# Altium footprint library MicroController$.PcbLib: 36 footprints (part 1 of 3)
Each footprint in its own frame and in the unit in brackets; x right, y up, seen from the top. Pads: shape width x height; smd on the part's side, far side on the other; paste and mask are expansions set on the pad; w line width, h text height; cw(c..) or ccw(c..) is an arc to the next point about the centre after c.
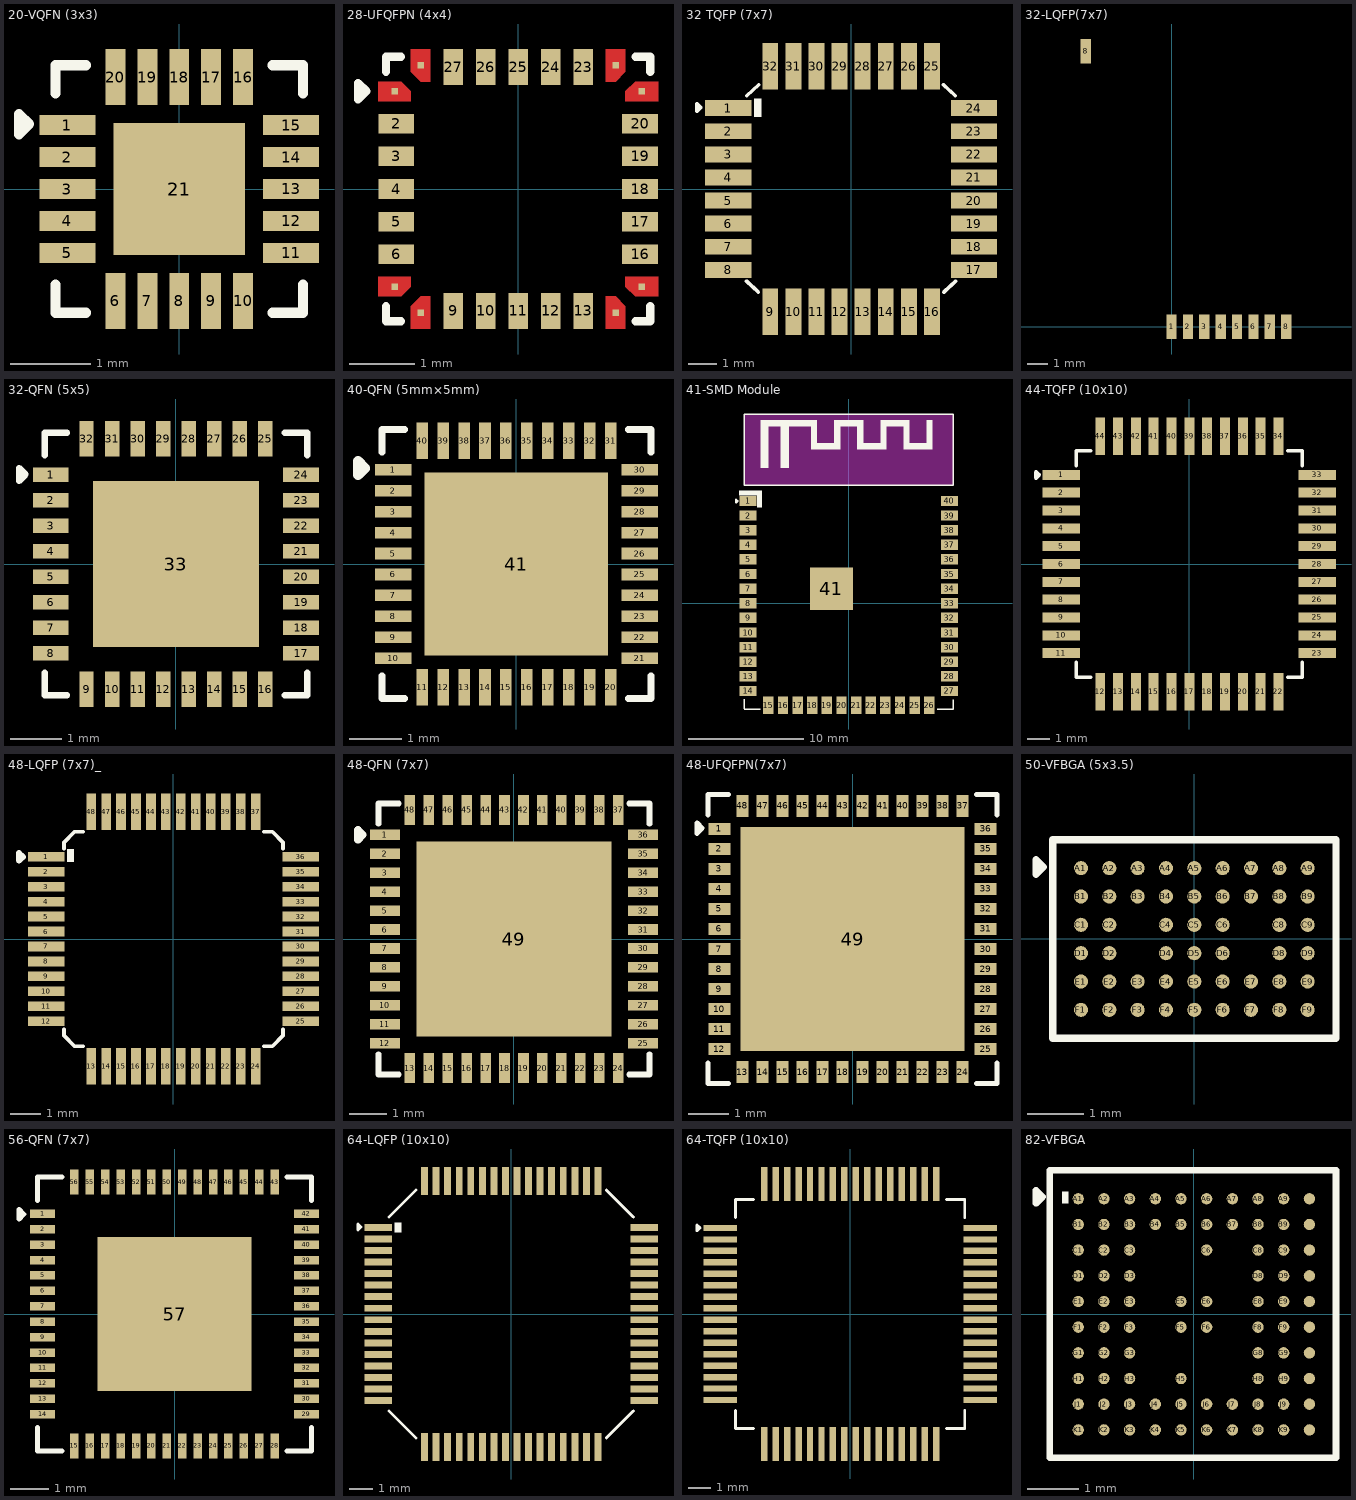
[diagram p0: the footprints below, top view; thin cyan lines are the x and y axes]

## 20-VQFN (3x3) [mm]
pads (21):
  rect 0.7x0.25 smd: 1(-1.4,0.8) 2(-1.4,0.4) 3(-1.4,0) 4(-1.4,-0.4) 5(-1.4,-0.8) 11(1.4,-0.8) 12(1.4,-0.4) 13(1.4,0) 14(1.4,0.4) 15(1.4,0.8)
  rect 0.25x0.7 smd: 6(-0.8,-1.4) 7(-0.4,-1.4) 8(0,-1.4) 9(0.4,-1.4) 10(0.8,-1.4) 16(0.8,1.4) 17(0.4,1.4) 18(0,1.4) 19(-0.4,1.4) 20(-0.8,1.4)
  rect 1.65x1.65 smd: 21(0,0)
Top Overlay:
  lines w0.127: -1.549,-1.194 -1.549,-1.549 -1.168,-1.549 ; -1.549,1.194 -1.549,1.549 -1.168,1.549 ; 1.168,-1.549 1.549,-1.549 1.549,-1.194 ; 1.168,1.549 1.549,1.549 1.549,1.194 ; -2.007,0.686 -1.88,0.813 -2.007,0.94 -2.007,0.686
3D body "VQFN20_3X3_MCH.step": height 0.59, standoff 0, extent -1.499,-1.499 1.499,1.499

## 28-UFQFPN (4x4) [mm]
pads (28):
  rect 0.1x0.1 smd paste-1 mask+0: 1(-1.9,1.5) 7(-1.9,-1.5) 8(-1.5,-1.9) 14(1.5,-1.9) 15(1.9,-1.5) 21(1.9,1.5) 22(1.5,1.9) 28(-1.5,1.9)
  rect 0.55x0.3 smd mask+0.08: 2(-1.875,1) 3(-1.875,0.5) 4(-1.875,0) 5(-1.875,-0.5) 6(-1.875,-1) 16(1.875,-1) 17(1.875,-0.5) 18(1.875,0) 19(1.875,0.5) 20(1.875,1)
  rect 0.3x0.55 smd mask+0.08: 9(-1,-1.875) 10(-0.5,-1.875) 11(0,-1.875) 12(0.5,-1.875) 13(1,-1.875) 23(1,1.875) 24(0.5,1.875) 25(0,1.875) 26(-0.5,1.875) 27(-1,1.875)
Top Layer:
  region: -1.35,1.65 -1.5,1.65 -1.65,1.8 -1.65,2.15 -1.35,2.15
  region: 1.65,1.8 1.5,1.65 1.35,1.65 1.35,2.15 1.65,2.15
  region: 2.15,1.35 1.65,1.35 1.65,1.5 1.8,1.65 2.15,1.65
  region: 2.15,-1.65 1.8,-1.65 1.65,-1.5 1.65,-1.35 2.15,-1.35
  region: 1.65,-1.8 1.65,-2.15 1.35,-2.15 1.35,-1.65 1.5,-1.65
  region: -1.35,-2.15 -1.65,-2.15 -1.65,-1.8 -1.5,-1.65 -1.35,-1.65
  region: -1.65,-1.5 -1.8,-1.65 -2.15,-1.65 -2.15,-1.35 -1.65,-1.35
  region: -1.65,1.5 -1.65,1.35 -2.15,1.35 -2.15,1.65 -1.8,1.65
Top Overlay:
  lines w0.127: -2.032,-1.803 -2.032,-2.032 -1.803,-2.032 ; -2.032,1.803 -2.032,2.032 -1.803,2.032 ; 1.803,-2.032 2.032,-2.032 2.032,-1.803 ; 1.803,2.032 2.032,2.032 2.032,1.803 ; -2.463,1.377 -2.463,1.631 -2.336,1.504 -2.463,1.377
3D body "STM32F042G6U6.step": height 0.6, standoff 0, extent -2,-2 2,2

## 32 TQFP (7x7) [mm]
pads (32):
  rect 1.6x0.55 smd: 1(-4.25,2.8) 2(-4.25,2) 3(-4.25,1.2) 4(-4.25,0.4) 5(-4.25,-0.4) 6(-4.25,-1.2) 7(-4.25,-2) 8(-4.25,-2.8) 17(4.25,-2.8) 18(4.25,-2) 19(4.25,-1.2) 20(4.25,-0.4) 21(4.25,0.4) 22(4.25,1.2) 23(4.25,2) 24(4.25,2.8)
  rect 0.55x1.6 smd: 9(-2.8,-4.25) 10(-2,-4.25) 11(-1.2,-4.25) 12(-0.4,-4.25) 13(0.4,-4.25) 14(1.2,-4.25) 15(2,-4.25) 16(2.8,-4.25) 25(2.8,4.25) 26(2,4.25) 27(1.2,4.25) 28(0.4,4.25) 29(-0.4,4.25) 30(-1.2,4.25) 31(-2,4.25) 32(-2.8,4.25)
Top Overlay:
  rectangle: -3.353,2.489 -3.099,3.124
  lines w0.127: -3.621,-3.189 -3.215,-3.57 ; -3.607,3.226 -3.2,3.607 ; 3.2,3.607 3.607,3.226 ; 3.215,-3.57 3.621,-3.189 ; -5.334,2.692 -5.334,2.946 -5.207,2.819 -5.334,2.692
3D body "ATMEGA168A-AU.STEP": height 1.18, standoff -0.02, extent -4.5,-4.5 4.5,4.5

## 32-LQFP(7x7) [mm]
pads (9):
  rect 0.5x1.2 smd: 1(0,0) 2(0.8,0) 3(1.6,0) 4(2.4,0) 5(3.2,0) 6(4,0) 7(4.8,0) 8(-4.191,13.462) 8(5.6,0)

## 32-QFN (5x5) [mm] "32pins, 5x5mm body, 0.5mm pitch QFN package"
pads (33):
  rect 0.7x0.28 smd: 1(-2.45,1.75) 2(-2.45,1.25) 3(-2.45,0.75) 4(-2.45,0.25) 5(-2.45,-0.25) 6(-2.45,-0.75) 7(-2.45,-1.25) 8(-2.45,-1.75) 17(2.45,-1.75) 18(2.45,-1.25) 19(2.45,-0.75) 20(2.45,-0.25) 21(2.45,0.25) 22(2.45,0.75) 23(2.45,1.25) 24(2.45,1.75)
  rect 0.28x0.7 smd: 9(-1.75,-2.45) 10(-1.25,-2.45) 11(-0.75,-2.45) 12(-0.25,-2.45) 13(0.25,-2.45) 14(0.75,-2.45) 15(1.25,-2.45) 16(1.75,-2.45) 25(1.75,2.45) 26(1.25,2.45) 27(0.75,2.45) 28(0.25,2.45) 29(-0.25,2.45) 30(-0.75,2.45) 31(-1.25,2.45) 32(-1.75,2.45)
  rect 3.254x3.254 smd: 33(0,0)
Top Overlay:
  lines w0.127: -2.565,-2.134 -2.565,-2.565 -2.134,-2.565 ; -2.565,2.134 -2.565,2.565 -2.134,2.565 ; 2.134,-2.565 2.565,-2.565 2.565,-2.134 ; 2.134,2.565 2.565,2.565 2.565,2.134 ; -3.073,1.626 -2.946,1.753 -3.073,1.88 -3.073,1.626
3D body "User Library-QFN-32-5x5 - EQ.STEP": height 0.85, standoff 0, extent -2.5,-2.5 2.5,2.5

## 40-QFN (5mm×5mm) [mm]
pads (41):
  rect 0.7x0.22 smd: 1(-2.35,1.8) 2(-2.35,1.4) 3(-2.35,1) 4(-2.35,0.6) 5(-2.35,0.2) 6(-2.35,-0.2) 7(-2.35,-0.6) 8(-2.35,-1) 9(-2.35,-1.4) 10(-2.35,-1.8) 21(2.35,-1.8) 22(2.35,-1.4) 23(2.35,-1) 24(2.35,-0.6) 25(2.35,-0.2) 26(2.35,0.2) 27(2.35,0.6) 28(2.35,1) 29(2.35,1.4) 30(2.35,1.8)
  rect 0.22x0.7 smd: 11(-1.8,-2.35) 12(-1.4,-2.35) 13(-1,-2.35) 14(-0.6,-2.35) 15(-0.2,-2.35) 16(0.2,-2.35) 17(0.6,-2.35) 18(1,-2.35) 19(1.4,-2.35) 20(1.8,-2.35) 31(1.8,2.35) 32(1.4,2.35) 33(1,2.35) 34(0.6,2.35) 35(0.2,2.35) 36(-0.2,2.35) 37(-0.6,2.35) 38(-1,2.35) 39(-1.4,2.35) 40(-1.8,2.35)
  rect 3.5x3.5 smd: 41(0,0)
Top Overlay:
  lines w0.127: -2.565,-2.134 -2.565,-2.565 -2.134,-2.565 ; -2.565,2.134 -2.565,2.565 -2.134,2.565 ; 2.134,-2.565 2.565,-2.565 2.565,-2.134 ; 2.134,2.565 2.565,2.565 2.565,2.134
  lines w0.2: -3.023,1.702 -2.896,1.829 -3.023,1.956 -3.023,1.702
3D body "User Library-QFN 40 5x5 pitch 0_4_STEP.step": height 0.61, standoff -0.03, extent -2.51,-2.51 2.51,2.51

## 41-SMD Module [mm]
pads (41):
  rect 1.5x0.9 smd: 1(-8.75,8.88) 2(-8.75,7.61) 3(-8.75,6.34) 4(-8.75,5.07) 5(-8.75,3.8) 6(-8.75,2.53) 7(-8.75,1.26) 8(-8.75,-0.01) 9(-8.75,-1.28) 10(-8.75,-2.55) 11(-8.75,-3.82) 12(-8.75,-5.09) 13(-8.75,-6.36) 14(-8.75,-7.63) 27(8.75,-7.63) 28(8.75,-6.36) 29(8.75,-5.09) 30(8.75,-3.82) 31(8.75,-2.55) 32(8.75,-1.28) 33(8.75,-0.01) 34(8.75,1.26) 35(8.75,2.53) 36(8.75,3.8) 37(8.75,5.07) 38(8.75,6.34) 39(8.75,7.61) 40(8.75,8.88)
  rect 0.9x1.5 smd: 15(-6.98,-8.88) 16(-5.71,-8.88) 17(-4.44,-8.88) 18(-3.17,-8.88) 19(-1.9,-8.88) 20(-0.63,-8.88) 21(0.64,-8.88) 22(1.91,-8.88) 23(3.18,-8.88) 24(4.45,-8.88) 25(5.72,-8.88) 26(6.99,-8.88)
  rect 3.7x3.7 smd: 41(-1.5,1.26)
Top Overlay:
  rectangle: -9.521,9.362 -7.541,9.802
  rectangle: -7.959,8.328 -7.541,9.406
  region: 7.29,13.36 7.29,15.9 6.756,15.9 6.756,13.36
  rectangle: 4.75,13.36 7.29,13.894
  region: 5.283,13.36 5.283,15.9 4.75,15.9 4.75,13.36
  rectangle: 2.743,15.367 5.283,15.9
  region: 3.277,13.36 3.277,15.9 2.743,15.9 2.743,13.36
  rectangle: 0.737,13.36 3.277,13.894
  region: 0.737,15.9 0.737,13.36 1.27,13.36 1.27,15.9
  rectangle: -1.27,15.367 1.27,15.9
  region: -0.737,13.36 -0.737,15.9 -1.27,15.9 -1.27,13.36
  rectangle: -3.277,13.36 -0.737,13.894
  region: -2.743,13.36 -2.743,15.9 -3.277,15.9 -3.277,13.36
  rectangle: -5.283,15.367 -2.743,15.9
  region: -5.207,15.9 -5.918,15.9 -5.918,11.735 -5.207,11.735
  rectangle: -7.671,15.367 -5.207,15.9
  rectangle: -7.671,11.735 -6.96,15.9
  lines w0.127: -9.064,-9.197 -7.669,-9.197 ; -9.064,-9.171 -9.064,-8.359 ; 7.677,-9.197 9.072,-9.197 9.072,-8.384 ; 9.086,10.244 -9.096,10.244 -9.096,16.434 9.091,16.434 9.091,10.244
  lines w0.2: -9.804,8.738 -9.804,8.992 -9.677,8.865 -9.804,8.738
Keep-Out Layer:
  rectangle: -9.042,10.287 9.042,16.383
3D body "ESP32-S3-WROOM.step": height 3.16, standoff 0, extent -9.01,-9.144 9.01,16.366

## 44-TQFP (10x10) [mm]
pads (44):
  rect 1.684x0.448 smd paste+0 mask+0.051: 1(-5.742,4) 2(-5.742,3.2) 3(-5.742,2.4) 4(-5.742,1.6) 5(-5.742,0.8) 6(-5.742,0) 7(-5.742,-0.8) 8(-5.742,-1.6) 9(-5.742,-2.4) 10(-5.742,-3.2) 11(-5.742,-4) 23(5.742,-4) 24(5.742,-3.2) 25(5.742,-2.4) 26(5.742,-1.6) 27(5.742,-0.8) 28(5.742,0) 29(5.742,0.8) 30(5.742,1.6) 31(5.742,2.4) 32(5.742,3.2) 33(5.742,4)
  rect 0.448x1.684 smd paste+0 mask+0.051: 12(-4,-5.742) 13(-3.2,-5.742) 14(-2.4,-5.742) 15(-1.6,-5.742) 16(-0.8,-5.742) 17(0,-5.742) 18(0.8,-5.742) 19(1.6,-5.742) 20(2.4,-5.742) 21(3.2,-5.742) 22(4,-5.742) 34(4,5.742) 35(3.2,5.742) 36(2.4,5.742) 37(1.6,5.742) 38(0.8,5.742) 39(0,5.742) 40(-0.8,5.742) 41(-1.6,5.742) 42(-2.4,5.742) 43(-3.2,5.742) 44(-4,5.742)
Top Overlay:
  lines w0.152: -5.076,-4.414 -5.076,-5.076 -4.414,-5.076 ; -5.076,4.414 -5.076,5.076 -4.414,5.076 ; 4.414,-5.076 5.076,-5.076 5.076,-4.414 ; 4.414,5.076 5.076,5.076 5.076,4.414
  lines w0.2: -6.885,3.873 -6.885,4.127 -6.758,4 -6.885,3.873
3D body "C31511.step": height 1.3, standoff 0, extent -6.002,-6.002 6.002,6.002

## 48-LQFP (7x7)_ [mm]
pads (48):
  rect 1.22x0.32 smd: 1(-4.25,2.75) 2(-4.25,2.25) 3(-4.25,1.75) 4(-4.25,1.25) 5(-4.25,0.75) 6(-4.25,0.25) 7(-4.25,-0.25) 8(-4.25,-0.75) 9(-4.25,-1.25) 10(-4.25,-1.75) 11(-4.25,-2.25) 12(-4.25,-2.75) 25(4.25,-2.75) 26(4.25,-2.25) 27(4.25,-1.75) 28(4.25,-1.25) 29(4.25,-0.75) 30(4.25,-0.25) 31(4.25,0.25) 32(4.25,0.75) 33(4.25,1.25) 34(4.25,1.75) 35(4.25,2.25) 36(4.25,2.75)
  rect 0.32x1.22 smd: 13(-2.75,-4.25) 14(-2.25,-4.25) 15(-1.75,-4.25) 16(-1.25,-4.25) 17(-0.75,-4.25) 18(-0.25,-4.25) 19(0.25,-4.25) 20(0.75,-4.25) 21(1.25,-4.25) 22(1.75,-4.25) 23(2.25,-4.25) 24(2.75,-4.25) 37(2.75,4.25) 38(2.25,4.25) 39(1.75,4.25) 40(1.25,4.25) 41(0.75,4.25) 42(0.25,4.25) 43(-0.25,4.25) 44(-0.75,4.25) 45(-1.25,4.25) 46(-1.75,4.25) 47(-2.25,4.25) 48(-2.75,4.25)
Top Overlay:
  rectangle: -3.556,2.565 -3.327,2.997
  lines w0.127: -3.658,-3.023 -3.658,-3.226 -3.302,-3.581 -3.023,-3.581 ; -3.658,3.023 -3.658,3.226 -3.302,3.581 -3.023,3.581 ; 3.023,-3.581 3.302,-3.581 3.658,-3.226 3.658,-3.023 ; 3.023,3.581 3.302,3.581 3.658,3.226 3.658,3.023
  lines w0.2: -5.156,2.616 -5.156,2.87 -5.029,2.743 -5.156,2.616
3D body "User Library-P-LQFP48-7x7-0_50.step": height 1.43, standoff -0.02, extent -4.513,-4.512 4.487,4.488

## 48-QFN (7x7) [mm]
pads (49):
  rect 0.79x0.28 smd paste-100 mask+0.051: 1(-3.407,2.75) 2(-3.407,2.25) 3(-3.407,1.75) 4(-3.407,1.25) 5(-3.407,0.75) 6(-3.407,0.25) 7(-3.407,-0.25) 8(-3.407,-0.75) 9(-3.407,-1.25) 10(-3.407,-1.75) 11(-3.407,-2.25) 12(-3.407,-2.75) 25(3.407,-2.75) 26(3.407,-2.25) 27(3.407,-1.75) 28(3.407,-1.25) 29(3.407,-0.75) 30(3.407,-0.25) 31(3.407,0.25) 32(3.407,0.75) 33(3.407,1.25) 34(3.407,1.75) 35(3.407,2.25) 36(3.407,2.75)
  rect 0.28x0.79 smd paste-100 mask+0.051: 13(-2.75,-3.407) 14(-2.25,-3.407) 15(-1.75,-3.407) 16(-1.25,-3.407) 17(-0.75,-3.407) 18(-0.25,-3.407) 19(0.25,-3.407) 20(0.75,-3.407) 21(1.25,-3.407) 22(1.75,-3.407) 23(2.25,-3.407) 24(2.75,-3.407) 37(2.75,3.407) 38(2.25,3.407) 39(1.75,3.407) 40(1.25,3.407) 41(0.75,3.407) 42(0.25,3.407) 43(-0.25,3.407) 44(-0.75,3.407) 45(-1.25,3.407) 46(-1.75,3.407) 47(-2.25,3.407) 48(-2.75,3.407)
  rect 5.15x5.15 smd paste-100 mask+0.051: 49(0,0)
Top Overlay:
  lines w0.152: -3.576,-3.042 -3.576,-3.576 -3.042,-3.576 ; -3.576,3.042 -3.576,3.576 -3.042,3.576 ; 3.042,-3.576 3.576,-3.576 3.576,-3.042 ; 3.042,3.576 3.576,3.576 3.576,3.042
  lines w0.2: -4.119,2.623 -3.992,2.75 -4.119,2.877 -4.119,2.623
Top Paste:
  drawing of 49 lines, arcs and shapes, not listed
3D body "C1343519.step": height 1, standoff 0, extent -3.5,-3.5 3.5,3.5

## 48-UFQFPN(7x7) [mm]
pads (49):
  rect 0.55x0.3 smd: 1(-3.325,2.75) 2(-3.325,2.25) 3(-3.325,1.75) 4(-3.325,1.25) 5(-3.325,0.75) 6(-3.325,0.25) 7(-3.325,-0.25) 8(-3.325,-0.75) 9(-3.325,-1.25) 10(-3.325,-1.75) 11(-3.325,-2.25) 12(-3.325,-2.75) 25(3.325,-2.75) 26(3.325,-2.25) 27(3.325,-1.75) 28(3.325,-1.25) 29(3.325,-0.75) 30(3.325,-0.25) 31(3.325,0.25) 32(3.325,0.75) 33(3.325,1.25) 34(3.325,1.75) 35(3.325,2.25) 36(3.325,2.75)
  rect 0.3x0.55 smd: 13(-2.75,-3.325) 14(-2.25,-3.325) 15(-1.75,-3.325) 16(-1.25,-3.325) 17(-0.75,-3.325) 18(-0.25,-3.325) 19(0.25,-3.325) 20(0.75,-3.325) 21(1.25,-3.325) 22(1.75,-3.325) 23(2.25,-3.325) 24(2.75,-3.325) 37(2.75,3.325) 38(2.25,3.325) 39(1.75,3.325) 40(1.25,3.325) 41(0.75,3.325) 42(0.25,3.325) 43(-0.25,3.325) 44(-0.75,3.325) 45(-1.25,3.325) 46(-1.75,3.325) 47(-2.25,3.325) 48(-2.75,3.325)
  rect 5.6x5.6 smd: 49(0,0)
Top Overlay:
  lines w0.127: -3.607,-3.099 -3.607,-3.607 -3.099,-3.607 ; -3.607,3.099 -3.607,3.607 -3.099,3.607 ; 3.099,-3.607 3.607,-3.607 3.607,-3.099 ; 3.099,3.607 3.607,3.607 3.607,3.099 ; -3.886,2.642 -3.886,2.896 -3.759,2.769 -3.886,2.642
3D body "UFQFPN-48_7X7X0P55MM.step": height 0.61, standoff 0, extent -3.556,-3.556 3.556,3.556

## 50-VFBGA (5x3.5) [mm]
pads (50):
  round 0.25 smd paste+0 mask+0.055: A1(-2,1.25) A2(-1.5,1.25) A3(-1,1.25) A4(-0.5,1.25) A5(0,1.25) A6(0.5,1.25) A7(1,1.25) A8(1.5,1.25) A9(2,1.25) B1(-2,0.75) B2(-1.5,0.75) B3(-1,0.75) B4(-0.5,0.75) B5(0,0.75) B6(0.5,0.75) B7(1,0.75) B8(1.5,0.75) B9(2,0.75) C1(-2,0.25) C2(-1.5,0.25) C4(-0.5,0.25) C5(0,0.25) C6(0.5,0.25) C8(1.5,0.25) C9(2,0.25) D1(-2,-0.25) D2(-1.5,-0.25) D4(-0.5,-0.25) D5(0,-0.25) D6(0.5,-0.25) D8(1.5,-0.25) D9(2,-0.25) E1(-2,-0.75) E2(-1.5,-0.75) E3(-1,-0.75) E4(-0.5,-0.75) E5(0,-0.75) E6(0.5,-0.75) E7(1,-0.75) E8(1.5,-0.75) E9(2,-0.75) F1(-2,-1.25) F2(-1.5,-1.25) F3(-1,-1.25) F4(-0.5,-1.25) F5(0,-1.25) F6(0.5,-1.25) F7(1,-1.25) F8(1.5,-1.25) F9(2,-1.25)
Top Overlay:
  lines w0.127: -2.794,1.143 -2.794,1.397 -2.667,1.27 -2.794,1.143 ; -2.5,-1.75 2.5,-1.75 2.5,1.75 -2.5,1.75 -2.5,-1.75
3D body "vfbga_5x3_5.stp": height 0.81, standoff -0.03, extent -2.5,-1.75 2.5,1.75

## 56-QFN (7x7) [mm]
pads (57):
  rect 0.65x0.22 smd mask+0.055: 1(-3.425,2.6) 2(-3.425,2.2) 3(-3.425,1.8) 4(-3.425,1.4) 5(-3.425,1) 6(-3.425,0.6) 7(-3.425,0.2) 8(-3.425,-0.2) 9(-3.425,-0.6) 10(-3.425,-1) 11(-3.425,-1.4) 12(-3.425,-1.8) 13(-3.425,-2.2) 14(-3.425,-2.6) 29(3.425,-2.6) 30(3.425,-2.2) 31(3.425,-1.8) 32(3.425,-1.4) 33(3.425,-1) 34(3.425,-0.6) 35(3.425,-0.2) 36(3.425,0.2) 37(3.425,0.6) 38(3.425,1) 39(3.425,1.4) 40(3.425,1.8) 41(3.425,2.2) 42(3.425,2.6)
  rect 0.22x0.65 smd mask+0.055: 15(-2.6,-3.425) 16(-2.2,-3.425) 17(-1.8,-3.425) 18(-1.4,-3.425) 19(-1,-3.425) 20(-0.6,-3.425) 21(-0.2,-3.425) 22(0.2,-3.425) 23(0.6,-3.425) 24(1,-3.425) 25(1.4,-3.425) 26(1.8,-3.425) 27(2.2,-3.425) 28(2.6,-3.425) 43(2.6,3.425) 44(2.2,3.425) 45(1.8,3.425) 46(1.4,3.425) 47(1,3.425) 48(0.6,3.425) 49(0.2,3.425) 50(-0.2,3.425) 51(-0.6,3.425) 52(-1,3.425) 53(-1.4,3.425) 54(-1.8,3.425) 55(-2.2,3.425) 56(-2.6,3.425)
  rect 4x4 smd mask+0.055: 57(0,0)
Top Overlay:
  lines w0.127: -3.556,-2.946 -3.556,-3.556 -2.921,-3.556 ; -3.556,2.946 -3.556,3.556 -2.921,3.556 ; 2.921,-3.556 3.556,-3.556 3.556,-2.946 ; 2.921,3.556 3.556,3.556 3.556,2.946 ; -4.039,2.464 -4.039,2.718 -3.912,2.591 -4.039,2.464
3D body "ESP32-S3R8.STEP": height 0.92, standoff -0.03, extent -3.5,-3.507 3.5,3.493

## 64-LQFP (10x10) [mm]
pads (64):
  rect 1.2x0.3 smd: 1(-5.75,3.75) 2(-5.75,3.25) 3(-5.75,2.75) 4(-5.75,2.25) 5(-5.75,1.75) 6(-5.75,1.25) 7(-5.75,0.75) 8(-5.75,0.25) 9(-5.75,-0.25) 10(-5.75,-0.75) 11(-5.75,-1.25) 12(-5.75,-1.75) 13(-5.75,-2.25) 14(-5.75,-2.75) 15(-5.75,-3.25) 16(-5.75,-3.75) 33(5.75,-3.75) 34(5.75,-3.25) 35(5.75,-2.75) 36(5.75,-2.25) 37(5.75,-1.75) 38(5.75,-1.25) 39(5.75,-0.75) 40(5.75,-0.25) 41(5.75,0.25) 42(5.75,0.75) 43(5.75,1.25) 44(5.75,1.75) 45(5.75,2.25) 46(5.75,2.75) 47(5.75,3.25) 48(5.75,3.75)
  rect 0.3x1.2 smd: 17(-3.75,-5.75) 18(-3.25,-5.75) 19(-2.75,-5.75) 20(-2.25,-5.75) 21(-1.75,-5.75) 22(-1.25,-5.75) 23(-0.75,-5.75) 24(-0.25,-5.75) 25(0.25,-5.75) 26(0.75,-5.75) 27(1.25,-5.75) 28(1.75,-5.75) 29(2.25,-5.75) 30(2.75,-5.75) 31(3.25,-5.75) 32(3.75,-5.75) 49(3.75,5.75) 50(3.25,5.75) 51(2.75,5.75) 52(2.25,5.75) 53(1.75,5.75) 54(1.25,5.75) 55(0.75,5.75) 56(0.25,5.75) 57(-0.25,5.75) 58(-0.75,5.75) 59(-1.25,5.75) 60(-1.75,5.75) 61(-2.25,5.75) 62(-2.75,5.75) 63(-3.25,5.75) 64(-3.75,5.75)
Top Overlay:
  rectangle: -5.055,3.531 -4.75,3.962
  lines w0.127: -5.283,-4.191 -4.115,-5.359 ; -5.283,4.191 -4.115,5.359 ; 4.115,-5.359 5.283,-4.191 ; 4.115,5.359 5.283,4.191 ; -6.629,3.632 -6.502,3.759 -6.629,3.886 -6.629,3.632
3D body "STM32F103RCT7.STEP": height 1.6, standoff 0, extent -6,-6 6,6

## 64-TQFP (10x10) [mm]
pads (64):
  rect 1.47x0.28 smd: 1(-5.67,3.75) 2(-5.67,3.25) 3(-5.67,2.75) 4(-5.67,2.25) 5(-5.67,1.75) 6(-5.67,1.25) 7(-5.67,0.75) 8(-5.67,0.25) 9(-5.67,-0.25) 10(-5.67,-0.75) 11(-5.67,-1.25) 12(-5.67,-1.75) 13(-5.67,-2.25) 14(-5.67,-2.75) 15(-5.67,-3.25) 16(-5.67,-3.75) 33(5.67,-3.75) 34(5.67,-3.25) 35(5.67,-2.75) 36(5.67,-2.25) 37(5.67,-1.75) 38(5.67,-1.25) 39(5.67,-0.75) 40(5.67,-0.25) 41(5.67,0.25) 42(5.67,0.75) 43(5.67,1.25) 44(5.67,1.75) 45(5.67,2.25) 46(5.67,2.75) 47(5.67,3.25) 48(5.67,3.75)
  rect 0.28x1.47 smd: 17(-3.75,-5.67) 18(-3.25,-5.67) 19(-2.75,-5.67) 20(-2.25,-5.67) 21(-1.75,-5.67) 22(-1.25,-5.67) 23(-0.75,-5.67) 24(-0.25,-5.67) 25(0.25,-5.67) 26(0.75,-5.67) 27(1.25,-5.67) 28(1.75,-5.67) 29(2.25,-5.67) 30(2.75,-5.67) 31(3.25,-5.67) 32(3.75,-5.67) 49(3.75,5.67) 50(3.25,5.67) 51(2.75,5.67) 52(2.25,5.67) 53(1.75,5.67) 54(1.25,5.67) 55(0.75,5.67) 56(0.25,5.67) 57(-0.25,5.67) 58(-0.75,5.67) 59(-1.25,5.67) 60(-1.75,5.67) 61(-2.25,5.67) 62(-2.75,5.67) 63(-3.25,5.67) 64(-3.75,5.67)
Top Overlay:
  lines w0.127: -5,-4.21 -5,-5 -4.21,-5 ; -5,4.21 -5,5 -4.21,5 ; 4.21,-5 5,-5 5,-4.21 ; 4.21,5 5,5 5,4.21 ; -6.68,3.632 -6.553,3.759 -6.68,3.886 -6.68,3.632
3D body "TQFP64_10x10MC_MCH.step": height 1.2, standoff 0, extent -5.994,-5.994 5.994,5.994

## 82-VFBGA [mm]
pads (82):
  round 0.22 smd paste+0 mask+0.055: A1(-2.25,2.25) A2(-1.75,2.25) A3(-1.25,2.25) A4(-0.75,2.25) A5(-0.25,2.25) A6(0.25,2.25) A7(0.75,2.25) A8(1.25,2.25) A9(1.75,2.25) A10(2.25,2.25) B1(-2.25,1.75) B2(-1.75,1.75) B3(-1.25,1.75) B4(-0.75,1.75) B5(-0.25,1.75) B6(0.25,1.75) B7(0.75,1.75) B8(1.25,1.75) B9(1.75,1.75) B10(2.25,1.75) C1(-2.25,1.25) C2(-1.75,1.25) C3(-1.25,1.25) C6(0.25,1.25) C8(1.25,1.25) C9(1.75,1.25) C10(2.25,1.25) D1(-2.25,0.75) D2(-1.75,0.75) D3(-1.25,0.75) D8(1.25,0.75) D9(1.75,0.75) D10(2.25,0.75) E1(-2.25,0.25) E2(-1.75,0.25) E3(-1.25,0.25) E5(-0.25,0.25) E6(0.25,0.25) E8(1.25,0.25) E9(1.75,0.25) E10(2.25,0.25) F1(-2.25,-0.25) F2(-1.75,-0.25) F3(-1.25,-0.25) F5(-0.25,-0.25) F6(0.25,-0.25) F8(1.25,-0.25) F9(1.75,-0.25) F10(2.25,-0.25) G1(-2.25,-0.75) G2(-1.75,-0.75) G3(-1.25,-0.75) G8(1.25,-0.75) G9(1.75,-0.75) G10(2.25,-0.75) H1(-2.25,-1.25) H2(-1.75,-1.25) H3(-1.25,-1.25) H5(-0.25,-1.25) H8(1.25,-1.25) H9(1.75,-1.25) H10(2.25,-1.25) J1(-2.25,-1.75) J2(-1.75,-1.75) J3(-1.25,-1.75) J4(-0.75,-1.75) J5(-0.25,-1.75) J6(0.25,-1.75) J7(0.75,-1.75) J8(1.25,-1.75) J9(1.75,-1.75) J10(2.25,-1.75) K1(-2.25,-2.25) K2(-1.75,-2.25) K3(-1.25,-2.25) K4(-0.75,-2.25) K5(-0.25,-2.25) K6(0.25,-2.25) K7(0.75,-2.25) K8(1.25,-2.25) K9(1.75,-2.25) K10(2.25,-2.25)
Top Overlay:
  rectangle: -2.565,2.159 -2.438,2.388
  lines w0.127: -3.073,2.159 -3.073,2.413 -2.946,2.286 -3.073,2.159 ; -2.807,-2.794 2.769,-2.794 2.769,2.807 -2.807,2.807 -2.807,-2.794
3D body "VFBGA82_3MX_MCH.step": height 0.89, standoff 0, extent -2.756,-2.756 2.756,2.756